# Altium footprint library ESP32 S31 Zero.PcbLib: 1 footprints
Each footprint in its own frame and in the unit in brackets; x right, y up, seen from the top. Pads: shape width x height; smd on the part's side, far side on the other; paste and mask are expansions set on the pad; w line width, h text height; cw(c..) or ccw(c..) is an arc to the next point about the centre after c.
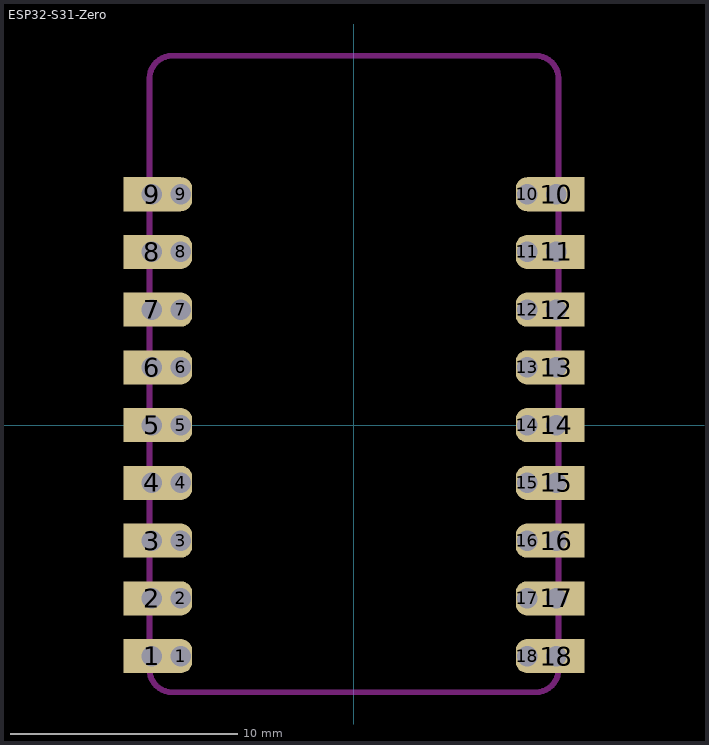
[diagram p0: the footprint, top view; thin cyan lines are the x and y axes]

## ESP32-S31-Zero [mm]
pads (36):
  rect 2.5x1.5 hole 0.9: 1(-8.89,-10.16) 2(-8.89,-7.62) 3(-8.89,-5.08) 4(-8.89,-2.54) 5(-8.89,0) 6(-8.89,2.54) 7(-8.89,5.08) 8(-8.89,7.62) 9(-8.89,10.16) 10(8.89,10.16) 11(8.89,7.62) 12(8.89,5.08) 13(8.89,2.54) 14(8.89,0) 15(8.89,-2.54) 16(8.89,-5.08) 17(8.89,-7.62) 18(8.89,-10.16)
  oval 1x1.5 hole 0.9: 1(-7.62,-10.16) 2(-7.62,-7.62) 3(-7.62,-5.08) 4(-7.62,-2.54) 5(-7.62,0) 6(-7.62,2.54) 7(-7.62,5.08) 8(-7.62,7.62) 9(-7.62,10.16) 10(7.62,10.16) 11(7.62,7.62) 12(7.62,5.08) 13(7.62,2.54) 14(7.62,0) 15(7.62,-2.54) 16(7.62,-5.08) 17(7.62,-7.62) 18(7.62,-10.16)
Keep-Out Layer:
  lines w0.254: -8,-11.75 cw(c-8,-10.75) -9,-10.75 -9,15.25 cw(c-8,15.25) -8,16.25 ; -7.99,-11.75 8.01,-11.75 ; -7.99,16.25 8.01,16.25 ; 8,-11.75 ccw(c8,-10.75) 9,-10.75 9,15.25 ccw(c8,15.25) 8,16.25